# Altium footprint library Connector_ScrewTerminal.PcbLib: 17 footprints (part 1 of 2)
Each footprint in its own frame and in the unit in brackets; x right, y up, seen from the top. Pads: shape width x height; smd on the part's side, far side on the other; paste and mask are expansions set on the pad; w line width, h text height; cw(c..) or ccw(c..) is an arc to the next point about the centre after c.
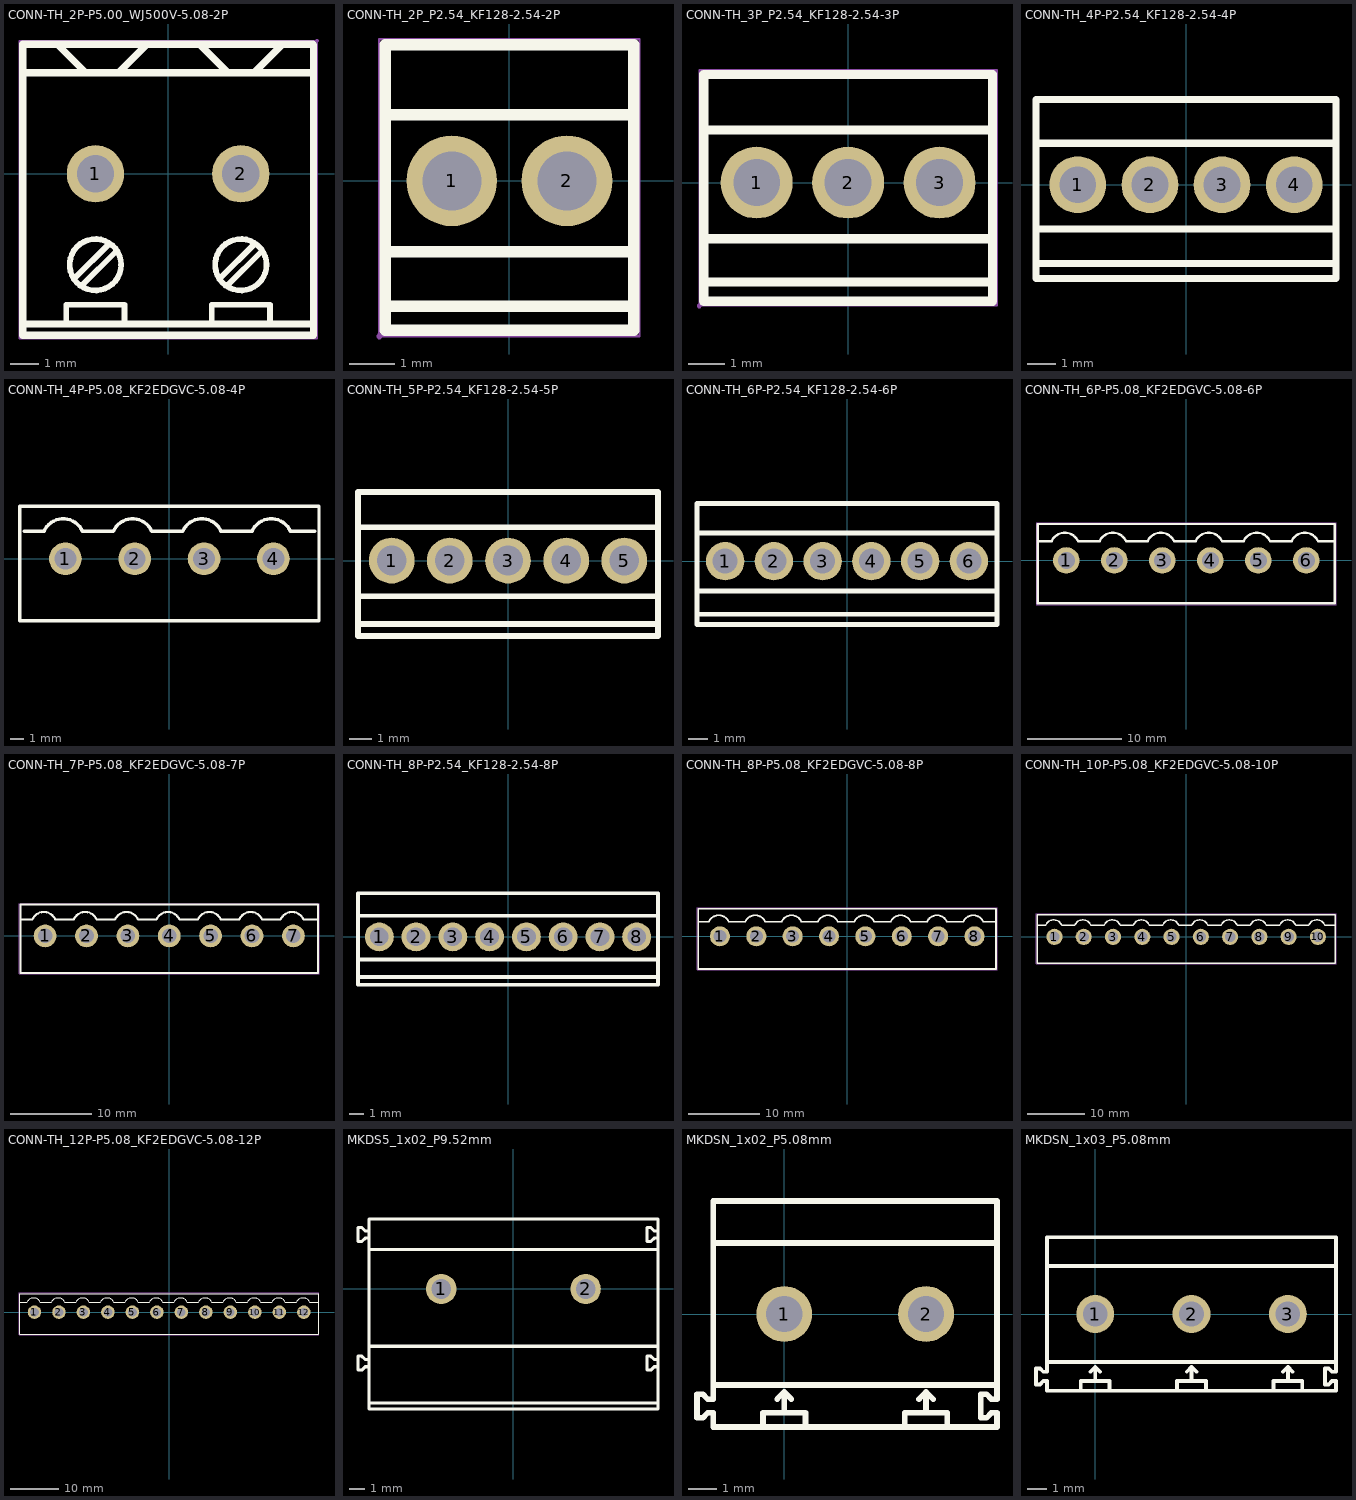
[diagram p0: the footprints below, top view; thin cyan lines are the x and y axes]

## CONN-TH_2P-P5.00_WJ500V-5.08-2P [mm]
pads (2):
  round 1.999 hole 1.3 mask+0.051: 1(-2.54,0) 2(2.54,0)
Top Overlay:
  circle w0.2: c2.54,-3.175 r0.898
  circle w0.2: c-2.54,-3.175 r0.898
  lines w0.2: -3.556,-5.243 -3.556,-4.572 -1.524,-4.572 -1.524,-5.243 ; -3.277,-3.658 -2.057,-2.438 ; -3.023,-3.912 -1.803,-2.692 ; 1.524,-5.243 1.524,-4.572 3.556,-4.572 3.556,-5.243 ; 1.803,-3.658 3.023,-2.438 ; 2.057,-3.912 3.277,-2.692
  lines w0.254: -5.08,-5.243 5.065,-5.243 ; -5.08,3.531 5.037,3.531 ; -3.861,4.519 -2.901,3.559 ; -1.709,3.559 -0.749,4.519 ; 1.12,4.501 2.08,3.541 ; 3.01,3.541 3.97,4.501 ; 5.055,-5.639 -5.08,-5.639 -5.08,4.521 5.055,4.521 ; 5.08,-5.641 5.08,4.519
Mechanical 15:
  region: 5.146,4.648 5.146,4.623 5.182,4.587 5.232,4.587 5.268,4.623 5.268,4.648 5.268,4.673 5.232,4.709 5.182,4.709 5.146,4.673 5.146,4.648
  region: -3.091,0 -3.091,-0.11 -3.007,-0.312 -2.852,-0.467 -2.65,-0.551 -2.43,-0.551 -2.228,-0.467 -2.073,-0.312 -1.989,-0.11 -1.989,0 -1.989,0.11 -2.073,0.312 -2.228,0.467 -2.43,0.551 -2.65,0.551 -2.852,0.467 -3.007,0.312 -3.091,0.11 -3.091,0
  region: 1.989,0 1.989,-0.11 2.073,-0.312 2.228,-0.467 2.43,-0.551 2.65,-0.551 2.852,-0.467 3.007,-0.312 3.091,-0.11 3.091,0 3.091,0.11 3.007,0.312 2.852,0.467 2.65,0.551 2.43,0.551 2.228,0.467 2.073,0.312 1.989,0.11 1.989,0
  lines w0.051: -5.207,-5.768 5.207,-5.768 5.207,4.648 -5.207,4.648 -5.207,-5.768
3D body "P1.stp": height 14.1, standoff -3.4, extent -5.08,-5.5 5.679,4.499

## CONN-TH_2P_P2.54_KF128-2.54-2P [mm]
pads (2):
  round 1.999 hole 1.3 mask+0.051: 1(-1.27,0) 2(1.27,0)
Top Overlay:
  lines w0.254: -2.741,-2.769 2.741,-2.769 ; -2.741,-1.562 2.741,-1.562 ; -2.741,1.458 2.741,1.458 ; -2.741,-3.299 2.741,-3.299 2.741,3 -2.741,3 -2.741,-3.299
Mechanical 15:
  region: -2.807,-3.426 -2.807,-3.401 -2.842,-3.365 -2.893,-3.365 -2.929,-3.401 -2.929,-3.426 -2.929,-3.452 -2.893,-3.487 -2.842,-3.487 -2.807,-3.452 -2.807,-3.426
  region: 1.821,0 1.821,0.11 1.737,0.312 1.582,0.467 1.38,0.551 1.16,0.551 0.958,0.467 0.803,0.312 0.719,0.11 0.719,0 0.719,-0.11 0.803,-0.312 0.958,-0.467 1.16,-0.551 1.38,-0.551 1.582,-0.467 1.737,-0.312 1.821,-0.11 1.821,0
  region: -0.719,0 -0.719,0.11 -0.803,0.312 -0.958,0.467 -1.16,0.551 -1.38,0.551 -1.582,0.467 -1.737,0.312 -1.821,0.11 -1.821,0 -1.821,-0.11 -1.737,-0.312 -1.582,-0.467 -1.38,-0.551 -1.16,-0.551 -0.958,-0.467 -0.803,-0.312 -0.719,-0.11 -0.719,0
  lines w0.051: -2.868,-3.426 -2.868,3.127 2.868,3.127 2.868,-3.426 -2.868,-3.426
3D body "U1.stp": height 8.8, standoff -3.5, extent -2.54,-3.299 2.541,3

## CONN-TH_3P_P2.54_KF128-2.54-3P [mm]
pads (3):
  round 1.999 hole 1.3 mask+0.051: 1(-2.54,0) 2(0,0) 3(2.54,0)
Top Overlay:
  lines w0.254: -4.011,-2.769 4.005,-2.769 ; -4.011,-1.562 4.011,-1.562 ; -4.011,1.458 4.011,1.458 ; -4.011,-3.299 -4.011,3 4.011,3 4.011,-3.299 -4.011,-3.299
Mechanical 15:
  region: -1.989,0 -1.989,0.11 -2.073,0.312 -2.228,0.467 -2.43,0.551 -2.65,0.551 -2.852,0.467 -3.007,0.312 -3.091,0.11 -3.091,0 -3.091,-0.11 -3.007,-0.312 -2.852,-0.467 -2.65,-0.551 -2.43,-0.551 -2.228,-0.467 -2.073,-0.312 -1.989,-0.11 -1.989,0
  region: 0.551,0 0.551,0.11 0.467,0.312 0.312,0.467 0.11,0.551 -0.11,0.551 -0.312,0.467 -0.467,0.312 -0.551,0.11 -0.551,0 -0.551,-0.11 -0.467,-0.312 -0.312,-0.467 -0.11,-0.551 0.11,-0.551 0.312,-0.467 0.467,-0.312 0.551,-0.11 0.551,0
  region: -4.077,-3.426 -4.077,-3.401 -4.112,-3.365 -4.163,-3.365 -4.199,-3.401 -4.199,-3.426 -4.199,-3.452 -4.163,-3.487 -4.112,-3.487 -4.077,-3.452 -4.077,-3.426
  region: 3.091,0 3.091,0.11 3.007,0.312 2.852,0.467 2.65,0.551 2.43,0.551 2.228,0.467 2.073,0.312 1.989,0.11 1.989,0 1.989,-0.11 2.073,-0.312 2.228,-0.467 2.43,-0.551 2.65,-0.551 2.852,-0.467 3.007,-0.312 3.091,-0.11 3.091,0
  lines w0.051: -4.138,-3.426 4.138,-3.426 4.138,3.127 -4.138,3.127 -4.138,-3.426
3D body "U1.stp": height 8.8, standoff -3.5, extent -3.81,-3.3 3.81,3

## CONN-TH_4P-P2.54_KF128-2.54-4P [mm]
pads (4):
  round 2 hole 1.3: 1(-3.81,0) 2(-1.27,0) 3(1.27,0) 4(3.81,0)
Top Overlay:
  lines w0.254: -5.28,-2.77 5.28,-2.77 ; -5.28,-1.562 5.28,-1.562 ; -5.28,1.458 5.28,1.458 ; -5.28,-3.3 -5.28,3 5.28,3 5.28,-3.3 -5.28,-3.3
3D body "CONN-TH_4P-P2.54_KF128-2.54-4P.stp": height 8.9, standoff -3.4, extent -5.08,-3.15 5.08,3.15

## CONN-TH_4P-P5.08_KF2EDGVC-5.08-4P [mm]
pads (4):
  round 2.4 hole 1.6 paste+0 mask+0.051: 1(-7.62,0) 2(-2.54,0) 3(2.54,0) 4(7.62,0)
Top Overlay:
  lines w0.254: -10.64,2.032 -9.177,2.032 cw(c-7.78,1.407) -6.383,2.032 -4.097,2.032 cw(c-2.7,1.407) -1.303,2.032 0.983,2.032 cw(c2.38,1.407) 3.777,2.032 6.063,2.032 cw(c7.46,1.407) 8.857,2.032 10.64,2.032 ; 10.64,-4.55 -10.64,-4.55 -10.96,-4.55 -10.96,3.85 -10.64,3.85 10.64,3.85 10.96,3.85 10.96,-4.55 10.64,-4.55 ; 10.64,-4.55 10.64,-4.55
Mechanical 15:
  region: 7.12,0.5 8.12,0.5 8.12,-0.5 7.12,-0.5
  region: 2.04,0.5 3.04,0.5 3.04,-0.5 2.04,-0.5
  region: -3.04,0.5 -2.04,0.5 -2.04,-0.5 -3.04,-0.5
  region: -8.12,0.5 -7.12,0.5 -7.12,-0.5 -8.12,-0.5
  region: -10.9,-4.55 -10.9,-4.525 -10.935,-4.49 -10.985,-4.49 -11.02,-4.525 -11.02,-4.55 -11.02,-4.575 -10.985,-4.61 -10.935,-4.61 -10.9,-4.575 -10.9,-4.55
  lines w0.051: -10.96,-4.55 10.96,-4.55 10.96,3.85 -10.96,3.85 -10.96,-4.55
3D body "CN2.stp": height 12.2, standoff -3.7, extent -10.96,-4.55 10.961,3.85

## CONN-TH_5P-P2.54_KF128-2.54-5P [mm]
pads (5):
  round 2 hole 1.3: 1(-5.08,0) 2(-2.54,0) 3(0,0) 4(2.54,0) 5(5.08,0)
Top Overlay:
  lines w0.254: -6.55,-2.77 6.55,-2.77 ; -6.55,-1.562 6.55,-1.562 ; -6.55,1.458 6.55,1.458 ; -6.55,-3.3 6.55,-3.3 6.55,3 -6.55,3 -6.55,-3.3
3D body "U2.stp": height 8.8, standoff -3.5, extent -6.35,-3.3 6.35,3

## CONN-TH_6P-P2.54_KF128-2.54-6P [mm]
pads (6):
  round 2 hole 1.3: 1(-6.35,0) 2(-3.81,0) 3(-1.27,0) 4(1.27,0) 5(3.81,0) 6(6.35,0)
Top Overlay:
  lines w0.254: -7.82,-2.77 7.805,-2.77 ; -7.82,-1.562 7.805,-1.562 ; -7.82,1.458 7.82,1.458 ; -7.82,-3.3 7.82,-3.3 7.82,3 -7.82,3 -7.82,-3.3
3D body "U1.stp": height 8.8, standoff -3.5, extent -7.619,-3.299 7.619,3

## CONN-TH_6P-P5.08_KF2EDGVC-5.08-6P [mm] "KF2EDGVC-5.08-6P"
pads (6):
  round 2.8 hole 1.8 paste+0 mask+0.051: 1(-12.7,0) 2(-7.62,0) 3(-2.54,0) 4(2.54,0) 5(7.62,0) 6(12.7,0)
Top Overlay:
  lines w0.254: -15.72,2.032 -14.257,2.032 cw(c-12.86,1.407) -11.463,2.032 -9.177,2.032 cw(c-7.78,1.407) -6.383,2.032 -4.097,2.032 cw(c-2.7,1.407) -1.303,2.032 0.983,2.032 cw(c2.38,1.407) 3.777,2.032 6.063,2.032 cw(c7.46,1.407) 8.857,2.032 11.143,2.032 cw(c12.54,1.407) 13.937,2.032 15.72,2.032 ; -15.72,-4.55 -15.72,3.85 15.72,3.85 15.72,-4.55 -15.72,-4.55
Mechanical 15:
  drawing of 11 lines, arcs and shapes, not listed
3D body "CN2.stp": height 12.2, standoff -3.7, extent -16.04,-4.55 16.04,3.851

## CONN-TH_7P-P5.08_KF2EDGVC-5.08-7P [mm] "KF2EDGVC-5.08-7P"
pads (7):
  round 2.8 hole 1.8 paste+0 mask+0.051: 1(-15.24,0) 2(-10.16,0) 3(-5.08,0) 4(0,0) 5(5.08,0) 6(10.16,0) 7(15.24,0)
Top Overlay:
  lines w0.254: -18.26,2.032 -16.797,2.032 cw(c-15.4,1.407) -14.003,2.032 -11.717,2.032 cw(c-10.32,1.407) -8.923,2.032 -6.637,2.032 cw(c-5.24,1.407) -3.843,2.032 -1.557,2.032 cw(c-0.16,1.407) 1.237,2.032 3.523,2.032 cw(c4.92,1.407) 6.317,2.032 8.603,2.032 cw(c10,1.407) 11.397,2.032 ; 13.18,2.032 11.397,2.032 ; 18.26,2.032 16.477,2.032 ccw(c15.08,1.407) 13.683,2.032 11.397,2.032 ; -18.26,-4.55 18.26,-4.55 18.26,3.85 -18.26,3.85 -18.26,-4.55
Mechanical 15:
  drawing of 13 lines, arcs and shapes, not listed
3D body "COMPOUND_3.stp": height 12.2, standoff -3.7, extent -18.58,-4.55 18.58,3.851

## CONN-TH_8P-P2.54_KF128-2.54-8P [mm]
pads (8):
  round 2 hole 1.3: 1(-8.89,0) 2(-6.35,0) 3(-3.81,0) 4(-1.27,0) 5(1.27,0) 6(3.81,0) 7(6.35,0) 8(8.89,0)
Top Overlay:
  lines w0.254: -10.36,-2.77 10.36,-2.77 ; -10.36,-1.562 10.36,-1.562 ; -10.36,1.458 10.36,1.458 ; -10.36,-3.3 10.36,-3.3 10.36,3 -10.36,3 -10.36,-3.3
3D body "U1.stp": height 8.8, standoff -3.5, extent -10.159,-3.299 10.159,3

## CONN-TH_8P-P5.08_KF2EDGVC-5.08-8P [mm] "KF2EDGVC-5.08-8P"
pads (8):
  round 2.8 hole 1.8 paste+0 mask+0.051: 1(-17.78,0) 2(-12.7,0) 3(-7.62,0) 4(-2.54,0) 5(2.54,0) 6(7.62,0) 7(12.7,0) 8(17.78,0)
Top Overlay:
  lines w0.254: -20.8,2.032 -19.337,2.032 cw(c-17.94,1.407) -16.543,2.032 -14.257,2.032 cw(c-12.86,1.407) -11.463,2.032 -9.177,2.032 cw(c-7.78,1.407) -6.383,2.032 -4.097,2.032 cw(c-2.7,1.407) -1.303,2.032 0.983,2.032 cw(c2.38,1.407) 3.777,2.032 6.063,2.032 cw(c7.46,1.407) 8.857,2.032 11.143,2.032 cw(c12.54,1.407) 13.937,2.032 16.223,2.032 cw(c17.62,1.407) 19.017,2.032 20.8,2.032 ; -20.8,-4.55 20.8,-4.55 20.8,3.85 -20.8,3.85 -20.8,-4.55
Mechanical 15:
  drawing of 13 lines, arcs and shapes, not listed
3D body "CONN-TH_8P-P5.08_KF2EDGVC-5.08-8P.stp": height 12.2, standoff -3.7, extent -21.12,-4.55 21.12,3.851

## CONN-TH_10P-P5.08_KF2EDGVC-5.08-10P [mm] "KF2EDGVC-5.08-8P"
pads (10):
  round 2.8 hole 1.8 paste+0 mask+0.051: 1(-22.86,0) 2(-17.78,0) 3(-12.7,0) 4(-7.62,0) 5(-2.54,0) 6(2.54,0) 7(7.62,0) 8(12.7,0) 9(17.78,0) 10(22.86,0)
Top Overlay:
  lines w0.254: -25.88,2.032 -24.417,2.032 cw(c-23.02,1.407) -21.623,2.032 -19.337,2.032 cw(c-17.94,1.407) -16.543,2.032 -14.257,2.032 cw(c-12.86,1.407) -11.463,2.032 -9.177,2.032 cw(c-7.78,1.407) -6.383,2.032 -4.097,2.032 cw(c-2.7,1.407) -1.303,2.032 0.983,2.032 cw(c2.38,1.407) 3.777,2.032 6.063,2.032 cw(c7.46,1.407) 8.857,2.032 11.143,2.032 cw(c12.54,1.407) 13.937,2.032 16.223,2.032 cw(c17.62,1.407) 19.017,2.032 21.303,2.032 cw(c22.7,1.407) 24.097,2.032 25.88,2.032 ; -25.88,-4.55 -25.88,3.85 25.88,3.85 25.88,-4.55 -25.88,-4.55
Mechanical 15:
  drawing of 15 lines, arcs and shapes, not listed
3D body "CN1.stp": height 12.2, standoff -3.7, extent -26.2,-4.55 26.2,3.851

## CONN-TH_12P-P5.08_KF2EDGVC-5.08-12P [mm] "KF2EDGVC-5.08-8P"
pads (12):
  round 2.8 hole 1.8 paste+0 mask+0.051: 1(-27.94,0) 2(-22.86,0) 3(-17.78,0) 4(-12.7,0) 5(-7.62,0) 6(-2.54,0) 7(2.54,0) 8(7.62,0) 9(12.7,0) 10(17.78,0) 11(22.86,0) 12(27.94,0)
Top Overlay:
  lines w0.254: -30.96,2.032 -29.497,2.032 cw(c-28.1,1.407) -26.703,2.032 -24.417,2.032 cw(c-23.02,1.407) -21.623,2.032 -19.337,2.032 cw(c-17.94,1.407) -16.543,2.032 -14.257,2.032 cw(c-12.86,1.407) -11.463,2.032 -9.177,2.032 cw(c-7.78,1.407) -6.383,2.032 -4.097,2.032 cw(c-2.7,1.407) -1.303,2.032 0.983,2.032 cw(c2.38,1.407) 3.777,2.032 6.063,2.032 cw(c7.46,1.407) 8.857,2.032 11.143,2.032 cw(c12.54,1.407) 13.937,2.032 16.223,2.032 cw(c17.62,1.407) 19.017,2.032 21.303,2.032 cw(c22.7,1.407) 24.097,2.032 26.383,2.032 cw(c27.78,1.407) 29.177,2.032 30.96,2.032 ; -30.96,-4.55 30.96,-4.55 30.96,3.85 -30.96,3.85 -30.96,-4.55
Mechanical 15:
  drawing of 17 lines, arcs and shapes, not listed
3D body "CN1.stp": height 12.2, standoff -3.7, extent -31.28,-4.55 31.28,3.851

## MKDS5_1x02_P9.52mm [mm]
pads (2):
  round 2 hole 1.3: 1(-4.76,0) 2(4.76,0)
Top Overlay:
  lines w0.203: -10.245,-4.9 -10.245,-5.35 -9.995,-5.35 -9.77,-5.125 -9.52,-5.125 ; -10.245,-4.875 -10.245,-4.425 -9.995,-4.425 -9.77,-4.65 -9.52,-4.65 ; -10.245,3.575 -10.245,3.125 -9.995,3.125 -9.77,3.35 -9.52,3.35 ; -10.245,3.6 -10.245,4.05 -9.995,4.05 -9.77,3.825 -9.52,3.825 ; -9.52,-7.525 9.52,-7.525 ; -9.52,-3.775 9.52,-3.775 ; -9.52,2.6 9.52,2.6 ; 8.795,-4.9 8.795,-5.35 9.045,-5.35 9.27,-5.125 9.52,-5.125 ; 8.795,-4.875 8.795,-4.425 9.045,-4.425 9.27,-4.65 9.52,-4.65 ; 8.795,3.575 8.795,3.125 9.045,3.125 9.27,3.35 9.52,3.35 ; 8.795,3.6 8.795,4.05 9.045,4.05 9.27,3.825 9.52,3.825 ; 9.52,-7.9 9.52,4.6 ; 9.525,-7.9 -9.52,-7.9 -9.52,4.6 9.525,4.6
3D body "1714971.stp": height 21.5, standoff -5, extent -10.09,-7.901 9.52,4.599

## MKDSN_1x02_P5.08mm [mm]
pads (2):
  round 2 hole 1.3: 1(0,0) 2(5.08,0)
Top Overlay:
  lines w0.203: -2.54,2.54 7.62,2.54 ; -0.762,-4.05 -0.762,-3.542 0.762,-3.542 0.762,-4.05 ; -0.254,-3.048 0,-2.794 ; 0,-3.542 0,-2.794 ; 0.254,-3.048 0,-2.794 ; 4.318,-4.05 4.318,-3.542 5.842,-3.542 5.842,-4.05 ; 4.826,-3.048 5.08,-2.794 ; 5.08,-3.542 5.08,-2.794 ; 5.334,-3.048 5.08,-2.794 ; -2.54,-2.54 -2.54,4.05 7.62,4.05 7.62,-2.54 ; -2.54,-2.54 7.62,-2.54 ; -2.54,-2.54 -2.54,-3.048 -2.743,-3.048 -2.921,-2.87 -3.124,-2.87 -3.124,-3.72 -2.921,-3.72 -2.743,-3.542 -2.54,-3.542 -2.54,-4.05 7.62,-4.05 7.62,-3.542 7.417,-3.542 7.239,-3.72 7.036,-3.72 7.036,-2.87 7.239,-2.87 7.417,-3.048 7.62,-3.048 7.62,-2.54
3D body "1729128.stp": height 10, standoff -3.5, extent -3.11,-4.036 7.62,4.064

## MKDSN_1x03_P5.08mm [mm]
pads (3):
  round 2 hole 1.3: 1(0,0) 2(5.08,0) 3(10.16,0)
Top Overlay:
  lines w0.203: -2.54,2.54 12.7,2.54 ; -0.762,-4.05 -0.762,-3.542 0.762,-3.542 0.762,-4.05 ; -0.254,-3.048 0,-2.794 ; 0,-3.542 0,-2.794 ; 0.254,-3.048 0,-2.794 ; 4.318,-4.05 4.318,-3.542 5.842,-3.542 5.842,-4.05 ; 4.826,-3.048 5.08,-2.794 ; 5.08,-3.542 5.08,-2.794 ; 5.334,-3.048 5.08,-2.794 ; 9.398,-4.05 9.398,-3.542 10.922,-3.542 10.922,-4.05 ; 9.906,-3.048 10.16,-2.794 ; 10.16,-3.542 10.16,-2.794 ; 10.414,-3.048 10.16,-2.794 ; -2.54,-2.54 -2.54,4.05 12.7,4.05 12.7,-2.54 ; -2.54,-2.54 12.7,-2.54 ; -2.54,-2.54 -2.54,-3.048 -2.743,-3.048 -2.921,-2.87 -3.124,-2.87 -3.124,-3.72 -2.921,-3.72 -2.743,-3.542 -2.54,-3.542 -2.54,-4.05 12.7,-4.05 12.7,-3.542 12.497,-3.542 12.319,-3.72 12.116,-3.72 12.116,-2.87 12.319,-2.87 12.497,-3.048 12.7,-3.048 12.7,-2.54
3D body "1729131.stp": height 10.1, standoff -3.4, extent -3.11,-4.05 12.7,4.05